# Altium schematic symbol library Ezlo.SchLib: 191 symbols (part 3 of 5)
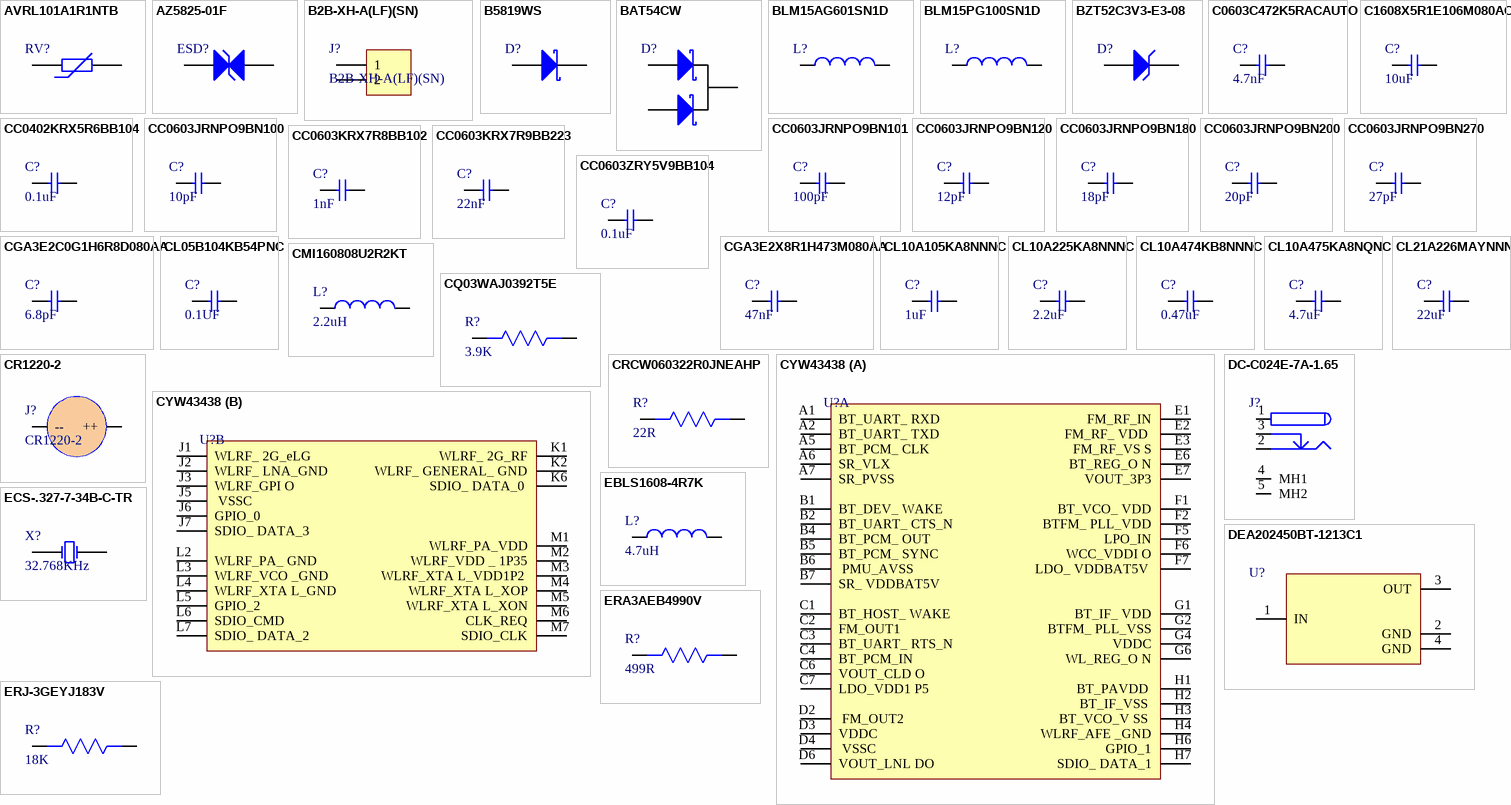
[diagram p10: symbols AVRL101A1R1NTB to ERJ-3GEYJ183V]

## ECS-.327-7-34B-C-TR
designator X?, comment 32.768KHz
Crystals 32.768KHz 7pF; Manufacturer: ECS International; Manufacturer Part Number: ECS-.327-7-34B-C-TR; ESR (Equivalent Series Resistance): 70kR; Frequency Tolerance: 10ppm; Supplier 1: Digi-Key; Stock 1: 27045; Pricing 1: 1=0.8, 10=0.708, 50=0.6622, 100=0.5852, 500=0.5544, 1000=0.462 (USD); Mount: Surface Mount; Case/Package: SMD/SMT; Number of Pins: 2; Min Operating Temperature: -40°C; Max Operating Temperature: 85°C; Frequency: 32.768kHz; Load Capacitance: 7pF; Package Quantity: 3000; Packaging: Tape and Reel; Termination: SMD/SMT; Frequency Stability: 10ppm; Length: 0.126inch; Height: 0.035inch; Width: 0.061inch; Lead Pitch: 2.4mm; ComponentLink1URL: https://datasheet.ciiva.com/12387/ecx-31b-15952-12387920.pdf; ComponentLink1Description: https://datasheet.ciiva.com/12387/ecx-31b-15952-12387920.pdf; ComponentLink2URL: https://datasheet.ciiva.com/15047/ecx-31b-15047071.pdf; ComponentLink2Description: https://datasheet.ciiva.com/15047/ecx-31b-15047071.pdf; Supplier Part Number 1: XC1948CT-ND
footprint ECS-.327-7-34B-C-TR (CRYSTAL 32.7680KHZ 12.5PF SMD)
pins: 1 OSC1, 2 OSC2

## ERA3AEB4990V
designator R?, comment 499R
RES SMD 499 OHM 0.1% 1/10W 0603; Manufacturer: Panasonic; Manufacturer Part Number: ERA-3AEB4990V; Power Rating: 100mW; Voltage Rating: 150V; Temperature Coefficient: 25ppm/°C; Voltage Rating (DC): 75V; Supplier 1: Arrow Electronics; RoHS: Yes; Category: Chip SMD Resistors; Stock 1: 4562; Pricing 1: 1=0.31590, 10=0.28840, 25=0.27580, 100=0.11110, 250=0.10990, 500=0.08340, 1000=0.04530, 3000=0.04480 (USD); Mount: Surface Mount; Case/Package: 0603; Number of Pins: 2; Case Code (Metric): 1608; Case Code (Imperial): 0603; Contact Plating: Tin; Min Operating Temperature: -55°C; Max Operating Temperature: 155°C; Resistance: 499R; Tolerance: 0.1%; Packaging: Tape and Reel; Package Quantity: 1; Resistor Type: Thin Film,Metal Film; Number of Terminations: 2; Termination: SMD/SMT; Max Power Dissipation: 100mW; Features: Automotive AEC-Q200; Series: ERA-3A; Resistance Tolerance: 0.1%; Construction: Rectangular; Technology: METAL FILM; Length: 1.6mm; Width: 0.8mm; Height: 0.45mm; Depth: 0.8mm; Radiation Hardening: No; REACH SVHC: No SVHC; Military Standard: Not; Lead Free: Lead Free; RoHS Compliant: Yes; ComponentLink1URL: https://datasheet.ciiva.com/11810/0900766b80eb1d8c-11810911.pdf?src-supplier=RSComponents; ComponentLink1Description: https://datasheet.ciiva.com/11810/0900766b80eb1d8c-11810911.pdf?src-supplier=RSComponents; ComponentLink2URL: https://datasheet.ciiva.com/29183/451973-da-01-en-widerstand-0603-era-29183924.pdf?src-supplier=Conrad; ComponentLink2Description: https://datasheet.ciiva.com/29183/451973-da-01-en-widerstand-0603-era-29183924.pdf?src-supplier=Conrad; ComponentLink3URL: https://datasheet.ciiva.com/6201/485442-6201036.pdf?src-supplier=Farnell; ComponentLink3Description: https://datasheet.ciiva.com/6201/485442-6201036.pdf?src-supplier=Farnell; ComponentLink4URL: https://datasheet.ciiva.com/7920/485442-7920378.pdf?src-supplier=Element14; ComponentLink4Description: https://datasheet.ciiva.com/7920/485442-7920378.pdf?src-supplier=Element14; ComponentLink5URL: https://datasheet.ciiva.com/7920/485442-7920379.pdf?src-supplier=Element14; ComponentLink5Description: https://datasheet.ciiva.com/7920/485442-7920379.pdf?src-supplier=Element14; ComponentLink6URL: https://datasheet.ciiva.com/9181/aoa0000ce26-9181477.pdf?src-supplier=Avnet; ComponentLink6Description: https://datasheet.ciiva.com/9181/aoa0000ce26-9181477.pdf?src-supplier=Avnet; ComponentLink7URL: https://datasheet.ciiva.com/30161/54aoa0000ce26-30161593.pdf?src-supplier=Onlinecomponents.com; ComponentLink7Description: https://datasheet.ciiva.com/30161/54aoa0000ce26-30161593.pdf?src-supplier=Onlinecomponents.com; Supplier Part Number 1: ERA-3AEB4990V
footprint Res0603
pins: 1, 2

## ERJ-3GEYJ183V
designator R?, comment 18K
RES SMD 18K OHM 5% 1/10W 0603; Manufacturer: Panasonic; Manufacturer Part Number: ERJ-3GEYJ183V; Resistance: 18kR; Power Rating: 100mW; Voltage Rating: 75V; Temperature Coefficient: 200ppm/°C; Voltage Rating (DC): 50V; Supplier 1: Digi-Key; RoHS: Yes; Category: Chip SMD Resistors; Stock 1: 113560; Pricing 1: 1=0.10000, 10=0.03300, 100=0.01360, 1000=0.00610, 2500=0.00529 (USD); Mount: Surface Mount; Case/Package: 0603; Case Code (Metric): 1608; Case Code (Imperial): 0603; Contact Plating: Tin; Min Operating Temperature: -55°C; Max Operating Temperature: 155°C; Tolerance: 5%; Packaging: Tape and Reel; Package Quantity: 1; Resistor Type: Thick Film; Number of Terminations: 2; Termination: SMD/SMT; Max Power Dissipation: 100mW; Features: Automotive AEC-Q200; Series: ERJ; Resistance Tolerance: 5%; Construction: Rectangular; Technology: THICK FILM; Length: 1.6mm; Width: 0.031inch; Height: 0.45mm; Depth: 0.8mm; REACH SVHC: No SVHC; Military Standard: Not; Lead Free: Contains Lead; RoHS Compliant: Yes; ComponentLink1URL: https://datasheet.ciiva.com/11821/0900766b80f806dd-11821418.pdf?src-supplier=RSComponents; ComponentLink1Description: https://datasheet.ciiva.com/11821/0900766b80f806dd-11821418.pdf?src-supplier=RSComponents; ComponentLink2URL: https://datasheet.ciiva.com/30227/4aoa0000ce1-30227125.pdf?src-supplier=Onlinecomponents.com; ComponentLink2Description: https://datasheet.ciiva.com/30227/4aoa0000ce1-30227125.pdf?src-supplier=Onlinecomponents.com; ComponentLink3URL: https://datasheet.ciiva.com/46443/1500035-46443766.pdf?src-supplier=Element14; ComponentLink3Description: https://datasheet.ciiva.com/46443/1500035-46443766.pdf?src-supplier=Element14; ComponentLink4URL: https://datasheet.ciiva.com/9192/aoa0000ce1-9192551.pdf?src-supplier=Avnet; ComponentLink4Description: https://datasheet.ciiva.com/9192/aoa0000ce1-9192551.pdf?src-supplier=Avnet; ComponentLink5URL: https://datasheet.ciiva.com/16786/70255313-16786967.pdf?src-supplier=Allied+Electronics; ComponentLink5Description: https://datasheet.ciiva.com/16786/70255313-16786967.pdf?src-supplier=Allied+Electronics; ComponentLink6URL: https://datasheet.ciiva.com/16775/70255313-16775307.pdf?src-supplier=Allied+Electronics; ComponentLink6Description: https://datasheet.ciiva.com/16775/70255313-16775307.pdf?src-supplier=Allied+Electronics; ComponentLink7URL: https://datasheet.ciiva.com/28590/1678796-28590973.pdf?src-supplier=Element14; ComponentLink7Description: https://datasheet.ciiva.com/28590/1678796-28590973.pdf?src-supplier=Element14; Supplier Part Number 1: P18KGCT-ND
footprint Res0603
pins: 1, 2

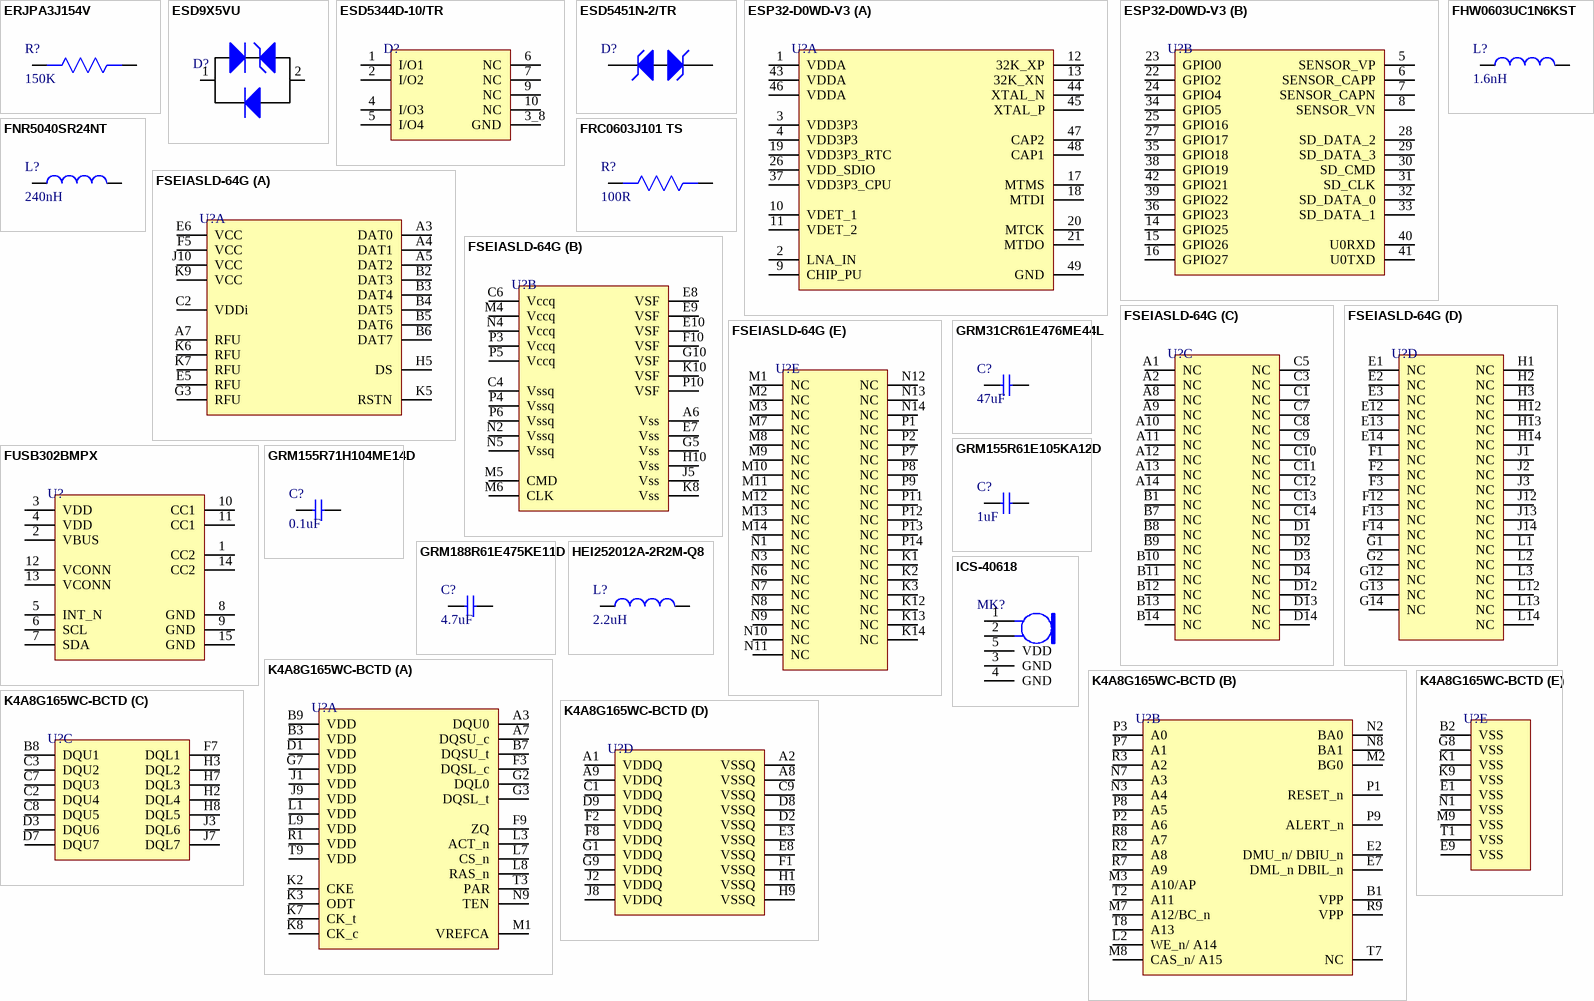
[diagram p2: symbols ERJPA3J154V to K4A8G165WC-BCTD]

## ERJPA3J154V
designator R?, comment 150K
RES SMD 150K OHM 5% 1/3W 0603; Manufacturer: Panasonic; Manufacturer Part Number: ERJ-PA3J154V; Resistance: 150kR; Max Power Dissipation: 250mW; Temperature Coefficient: 200ppm/°C; Supplier 1: Arrow Electronics; RoHS: Yes; Category: Chip SMD Resistors; Stock 1: 30; Pricing 1: 1=0.09570, 10=0.08790, 100=0.03390, 1000=0.01520, 2500=0.01310, 5000=0.01070 (USD); Case/Package: 0603; Case Code (Imperial): 0603; Case Code (Metric): 1608; Min Operating Temperature: -55°C; Max Operating Temperature: 155°C; Features: Automotive AEC-Q200; Tolerance: 5%; Packaging: Tape and Reel; Resistor Type: Thick Film; Number of Terminations: 2; Length: 0.063inch; Width: 0.031inch; Height: 0.018inch; ComponentLink1URL: https://industrial.panasonic.com/cdbs/www-data/pdf/RDO0000/AOA0000C331.pdf?src-supplier=Digi-Key; ComponentLink1Description: https://industrial.panasonic.com/cdbs/www-data/pdf/RDO0000/AOA0000C331.pdf?src-supplier=Digi-Key; Supplier Part Number 1: ERJ-PA3J154V
footprint Res0603
pins: 1, 2

## ESD9X5VU
designator D?
DFN1006-2 ESD Protection Devices ROHS; Manufacturer: TECH PUBLIC; Manufacturer Part Number: ESD9X5VU; Footprint: DFN1006-2; ComponentLink1Description: LCSC; ComponentLink1URL: https://www.lcsc.com/product-detail/span-style-background-color-ff0-ESD-span-Protection-Devices_TECH-PUBLIC-ESD9X5VU_C2875160.html
footprint DFN1006-2L
pins: 1, 2

## ESD5344D-10/TR
designator D?
DFN2510-10L ESD Protection Devices ROHS; Manufacturer: WILLSEMI; Manufacturer Part Number: ESD5344D-10/TR; ComponentLink1Description: LCSC; ComponentLink1URL: https://www.lcsc.com/product-detail/span-style-background-color-ff0-ESD-span-Protection-Devices_WILLSEMI-Will-Semicon-ESD5344D-10-TR_C239666.html; Footprint: DFN2510-10L
footprint DFN2510-10L
pins: 1 I/O1, 2 I/O2, 3_8 GND, 4 I/O3, 5 I/O4, 6 NC, 7 NC, 9 NC, 10 NC

## ESD5451N-2/TR
designator D?
DFN1006-2L ESD Protection Devices ROHS; Manufacturer: WILLSEMI; Manufacturer Part Number: ESD5451N-2/TR; ComponentLink1Description: LCSC; ComponentLink1URL: https://www.lcsc.com/product-detail/TVS_Will-Semicon-ESD5451N-2-TR_C239604.html; Footprint: DFN1006-2L
footprint DFN1006-2L
pins: 1 K, 2 k

## ESP32-D0WD-V3
designator U?
IC RF TXRX+MCU BLUETOOTH WIFI; Manufacturer: Espressif Systems; Manufacturer Part Number: ESP32-D0WD-V3; Supplier 1: Digi-Key; RoHS: No; Category: RF Receivers, Transceivers; Stock 1: 29666; Pricing 1: 1=1.80000 (USD); Supplier Part Number 1: 1904-ESP32-D0WD-V3CT-ND
footprint ESP32-D0WD-V3
part A pins: 1 VDDA, 2 LNA_IN, 3 VDD3P3, 4 VDD3P3, 9 CHIP_PU, 10 VDET_1, 11 VDET_2, 12 32K_XP, 13 32K_XN, 17 MTMS, 18 MTDI, 19 VDD3P3_RTC, 20 MTCK, 21 MTDO, 26 VDD_SDIO, 37 VDD3P3_CPU, 43 VDDA, 44 XTAL_N, 45 XTAL_P, 46 VDDA, 47 CAP2, 48 CAP1, 49 GND
part B pins: 5 SENSOR_VP, 6 SENSOR_CAPP, 7 SENSOR_CAPN, 8 SENSOR_VN, 14 GPIO25, 15 GPIO26, 16 GPIO27, 22 GPIO2, 23 GPIO0, 24 GPIO4, 25 GPIO16, 27 GPIO17, 28 SD_DATA_2, 29 SD_DATA_3, 30 SD_CMD, 31 SD_CLK, 32 SD_DATA_0, 33 SD_DATA_1, 34 GPIO5, 35 GPIO18, 36 GPIO23, 38 GPIO19, 39 GPIO22, 40 U0RXD, 41 U0TXD, 42 GPIO21

## FHW0603UC1N6KST
designator L?, comment 1.6nH
700mA 1.6nH ±10% 40mΩ 0603 Inductors (SMD) ROHS; Manufacturer Part Number: FHW0603UC1N6KST; Manufacturer: FH; Footprint: 0603; Value: 1.6nH
footprint IND 0603
pins: 1, 2

## FNR5040SR24NT
designator L?, comment 240nH
6.4A 240nH ±30% 8mΩ SMD Power Inductors ROHS; Manufacturer: cjiang; Manufacturer Part Number: FNR5040SR24NT; Footprint: Custom; ComponentLink1Description: LCSC; ComponentLink1URL: https://www.lcsc.com/product-detail/span-style-background-color-ff0-Power-span-span-style-background-color-ff0-Inductors-span_cjiang-Changjiang-Microelectronics-Tech-FNR5040SR24NT_C167951.html
footprint FNR5040SR24NT
pins: 1, 2

## FRC0603J101 TS
designator R?, comment 100R
100mW Thick Film Resistors 50V ±5% ±100ppm/℃ -55℃~+155℃ 100Ω 0603 Chip Resistor - Surface Mount ROHS; Manufacturer Part Number: FRC0603J101 TS; Manufacturer: FOJAN; Value: 100R; Footprint: 0603
footprint Res0603
pins: 1, 2

## FSEIASLD-64G
designator U?
BGA-153 eMMC ROHS; Manufacturer: FORESEE; Manufacturer Part Number: FSEIASLD-64G; Footprint: BGA-153; ComponentLink1Description: LCSC; ComponentLink1URL: https://lcsc.com/product-detail/eMMC_FORESEE-FSEIASLD-64G_C719922.html
footprint BGA-153
part A pins: A3 DAT0, A4 DAT1, A5 DAT2, A7 RFU, B2 DAT3, B3 DAT4, B4 DAT5, B5 DAT6, B6 DAT7, C2 VDDi, E5 RFU, E6 VCC, F5 VCC, G3 RFU, H5 DS, J10 VCC, K5 RSTN, K6 RFU, K7 RFU, K9 VCC
part B pins: A6 Vss, C4 Vssq, C6 Vccq, E7 Vss, E8 VSF, E9 VSF, E10 VSF, F10 VSF, G5 Vss, G10 VSF, H10 Vss, J5 Vss, K8 Vss, K10 VSF, M4 Vccq, M5 CMD, M6 CLK, N2 Vssq, N4 Vccq, N5 Vssq, P3 Vccq, P4 Vssq, P5 Vccq, P6 Vssq, P10 VSF
part C pins: A1 NC, A2 NC, A8 NC, A9 NC, A10 NC, A11 NC, A12 NC, A13 NC, A14 NC, B1 NC, B7 NC, B8 NC, B9 NC, B10 NC, B11 NC, B12 NC, B13 NC, B14 NC, C1 NC, C3 NC, C5 NC, C7 NC, C8 NC, C9 NC, C10 NC, C11 NC, C12 NC, C13 NC, C14 NC, D1 NC, D2 NC, D3 NC, D4 NC, D12 NC, D13 NC, D14 NC
part D pins: E1 NC, E2 NC, E3 NC, E12 NC, E13 NC, E14 NC, F1 NC, F2 NC, F3 NC, F12 NC, F13 NC, F14 NC, G1 NC, G2 NC, G12 NC, G13 NC, G14 NC, H1 NC, H2 NC, H3 NC, H12 NC, H13 NC, H14 NC, J1 NC, J2 NC, J3 NC, J12 NC, J13 NC, J14 NC, L1 NC, L2 NC, L3 NC, L12 NC, L13 NC, L14 NC
part E pins: K1 NC, K2 NC, K3 NC, K12 NC, K13 NC, K14 NC, M1 NC, M2 NC, M3 NC, M7 NC, M8 NC, M9 NC, M10 NC, M11 NC, M12 NC, M13 NC, M14 NC, N1 NC, N3 NC, N6 NC, N7 NC, N8 NC, N9 NC, N10 NC, N11 NC, N12 NC, N13 NC, N14 NC, P1 NC, P2 NC, P7 NC, P8 NC, P9 NC, P11 NC, P12 NC, P13 NC, P14 NC

## FUSB302BMPX
designator U?
Full Speed Programmable USB Power Delivery Controller USB 3.1 3.3V T/R 14-Pin WQFN EP; Manufacturer: ON Semiconductor / Fairchild; Manufacturer Part Number: FUSB302MPX; Operating Supply Current: 25uA; Supplier 1: RSComponents; RoHS: Yes; Category: Integrated Circuits (ICs); Stock 1: 95; Pricing 1: 3000=0.62400 (GBP); Mount: Surface Mount; Min Operating Temperature: -40°C; Max Operating Temperature: 85°C; Interface: USB; Packaging: Cut Tape; RoHS Compliant: Yes; ComponentLink1URL: http://www.farnell.com/datasheets/2313409.pdf?src-supplier=Farnell; ComponentLink1Description: http://www.farnell.com/datasheets/2313409.pdf?src-supplier=Farnell; ComponentLink2URL: http://www.mouser.com/ds/2/149/FUSB302-769336.pdf?src-supplier=Mouser; ComponentLink2Description: http://www.mouser.com/ds/2/149/FUSB302-769336.pdf?src-supplier=Mouser; ComponentLink3URL: https://www.fairchildsemi.com/datasheets/FU/FUSB302.pdf?src-supplier=Digi-Key; ComponentLink3Description: https://www.fairchildsemi.com/datasheets/FU/FUSB302.pdf?src-supplier=Digi-Key; Supplier Part Number 1: 1464429; Supplier 2: Digi-Key; Stock 2: 9412; Pricing 2: 1=1.27000, 10=1.13500, 25=1.07720, 100=0.88500, 250=0.82728, 500=0.73108, 1000=0.57717 (USD); ComponentLink4URL: http://www.farnell.com/datasheets/2313408.pdf?src-supplier=Farnell; ComponentLink4Description: http://www.farnell.com/datasheets/2313408.pdf?src-supplier=Farnell; ComponentLink5URL: http://www.onsemi.com/pub/Collateral/FUSB302B-D.PDF?src-supplier=Digi-Key; ComponentLink5Description: http://www.onsemi.com/pub/Collateral/FUSB302B-D.PDF?src-supplier=Digi-Key; Supplier Part Number 2: FUSB302BMPXCT-ND
footprint 14-MLP (2.5x2.5)
pins: 1 CC2, 2 VBUS, 3 VDD, 4 VDD, 5 INT_N, 6 SCL, 7 SDA, 8 GND, 9 GND, 10 CC1, 11 CC1, 12 VCONN, 13 VCONN, 14 CC2, 15 GND

## GRM31CR61E476ME44L
designator C?, comment 47uF
CAP CER 47UF 25V X5R 1206; Manufacturer: Murata; Manufacturer Part Number: GRM31CR61E476ME44L; Tolerance: 20%; Supplier 1: Digi-Key; RoHS: Yes; Category: Ceramic Capacitors; Voltage Rating (DC): 25V; Dielectric: X5R; Capacitance: 47uF; Length: 3.2mm; Width: 1.6mm; Thickness: 1.6mm; RoHS Compliant: Yes; ComponentLink1URL: https://search.murata.co.jp/Ceramy/image/img/A01X/partnumbering_e_01.pdf?src-supplier=Digi-Key; ComponentLink1Description: https://search.murata.co.jp/Ceramy/image/img/A01X/partnumbering_e_01.pdf?src-supplier=Digi-Key; Supplier Part Number 1: 490-16268-2-ND
footprint Cap1206 (SMD 1206)
pins: 1, 2

## GRM155R61E105KA12D
designator C?, comment 1uF
CAP CER 1UF 25V X5R 0402; Manufacturer: Murata; Manufacturer Part Number: GRM155R61E105KA12D; Material: Ceramic; Tolerance: 10%; Supplier 1: Digi-Key; Stock 1: 1194305; Pricing 1: 1=0.11, 10=0.077, 100=0.0363, 500=0.02546, 1000=0.02108, 2500=0.01962, 5000=0.01795 (USD); Mount: Surface Mount; Case/Package: 0402; Weight: 0.000212oz; Case Code (Metric): 1005; Case Code (Imperial): 0402; Min Operating Temperature: -55°C; Max Operating Temperature: 85°C; Capacitance: 1uF; Voltage Rating: 25V; Packaging: Tape and Reel; Dielectric: X5R; Voltage: 25V; Termination: SMD/SMT; Voltage Rating (DC): 25V; Package Quantity: 10000; Length: 1mm; Height: 0.5mm; Width: 0.5mm; Thickness: 0.022inch; Depth: 0.5mm; REACH SVHC: No SVHC; Lead Free: Lead Free; ComponentLink1URL: http://www.farnell.com/datasheets/2048341.pdf?src-supplier=Element14; ComponentLink1Description: http://www.farnell.com/datasheets/2048341.pdf?src-supplier=Element14; Supplier Part Number 1: 490-10017-1-ND
footprint Cap0402
pins: 1, 2

## GRM155R71H104ME14D
designator C?, comment 0.1uF
CAP CER 0.1UF 50V X7R 0402; Manufacturer: Murata; Manufacturer Part Number: GRM155R71H104ME14D; Tolerance: 20%; Capacitance: 100nF; Supplier 1: Digi-Key; Stock 1: 439844; Pricing 1: 1=0.1, 10=0.038, 100=0.0168, 500=0.01198, 1000=0.00941, 2500=0.00855, 5000=0.00787 (USD); Mount: Surface Mount; Case/Package: 0402; Min Operating Temperature: -55°C; Max Operating Temperature: 125°C; Packaging: Cut Tape; Voltage Rating: 50V; Length: 0.039inch; Width: 0.02inch; Thickness: 0.022inch; ComponentLink1URL: http://search.murata.co.jp/Ceramy/image/img/A01X/G101/ENG/GRM155R71H104ME14-01.pdf?src-supplier=Digi-Key; ComponentLink1Description: http://search.murata.co.jp/Ceramy/image/img/A01X/G101/ENG/GRM155R71H104ME14-01.pdf?src-supplier=Digi-Key; ComponentLink2URL: http://psearch.en.murata.com/capacitor/product/GRM155R71H104ME14%23.pdf?src-supplier=Avnet; ComponentLink2Description: http://psearch.en.murata.com/capacitor/product/GRM155R71H104ME14%23.pdf?src-supplier=Avnet; ComponentLink3URL: http://components.arrow.com/part/dataview/0323_07177683?src-supplier=Arrow+Europe; ComponentLink3Description: http://components.arrow.com/part/dataview/0323_07177683?src-supplier=Arrow+Europe; ComponentLink4URL: http://www.mouser.com/ds/2/281/c02e-2905.pdf?src-supplier=Mouser; ComponentLink4Description: http://www.mouser.com/ds/2/281/c02e-2905.pdf?src-supplier=Mouser; Supplier Part Number 1: 490-10701-1-ND
footprint Cap 0402
pins: 1, 2

## GRM188R61E475KE11D
designator C?, comment 4.7uF
CAP CER 4.7UF 25V X5R 0603; Manufacturer: Murata; Manufacturer Part Number: GRM188R61E475KE11D; Material: Ceramic; Tolerance: 10%; Supplier 1: Digi-Key; Stock 1: 71618; Pricing 1: 1=0.37, 10=0.258, 100=0.1549, 500=0.1162, 1000=0.09812 (USD); Mount: Surface Mount; Case/Package: 0603; Case Code (Metric): 1608; Case Code (Imperial): 0603; Min Operating Temperature: -55°C; Max Operating Temperature: 85°C; Package Quantity: 4000; Packaging: Cut Tape; Capacitance: 4.7uF; Voltage Rating: 25V; Dielectric: X5R; Voltage: 25V; Voltage Rating (DC): 25V; Length: 1.6mm; Height: 0.8mm; Width: 0.031inch; Thickness: 0.031inch; Depth: 0.8mm; REACH SVHC: No SVHC; Lead Free: Lead Free; ComponentLink1URL: http://www.farnell.com/datasheets/2048165.pdf?src-supplier=Element14; ComponentLink1Description: http://www.farnell.com/datasheets/2048165.pdf?src-supplier=Element14; ComponentLink2URL: https://www.murata.com/~/media/webrenewal/support/library/catalog/products/capacitor/mlcc/c02e.ashx?la=en-us&src-supplier=Digi-Key; ComponentLink2Description: https://www.murata.com/~/media/webrenewal/support/library/catalog/products/capacitor/mlcc/c02e.ashx?la=en-us&src-supplier=Digi-Key; Supplier Part Number 1: 490-7203-1-ND
footprint Cap0603
pins: 1, 2

## HEI252012A-2R2M-Q8
designator L?, comment 2.2uH
2.5A 2.2uH ±20% 74mΩ SMD Power Inductors ROHS; Manufacturer: Chilisin Elec; Manufacturer Part Number: HEI252012A-2R2M-Q8; ComponentLink1Description: LCSC; ComponentLink1URL: https://lcsc.com/product-detail/Power-Inductors_Chilisin-Elec-HEI252012A-2R2M-Q8_C412888.html; Footprint: Custom
footprint HEI252012A-2R2M-Q8 (IND SMD 2.2uH 2.5A)
pins: 1, 2

## ICS-40618
designator MK?
MICROPHONE MEMS ANALOG OMNI; Manufacturer: TDK InvenSense; Manufacturer Part Number: ICS-40618; Shape: Rectangular; Direction: Omnidirectional; Operating Supply Current: 190uA; Supplier 1: RSComponents; RoHS: No; Category: Microphones; Stock 1: 500; Pricing 1: 200=1.80400, 1000=1.75400, 2500=1.71200, 5000=1.66700 (GBP); Output Type: Analog; Packaging: Tape and Reel; Termination: Solder; RoHS Compliant: No; ComponentLink1URL: https://www.mouser.com/ds/2/400/DS-000044-ICS-40618-v1.0-1115536.pdf?src-supplier=Mouser; ComponentLink1Description: https://www.mouser.com/ds/2/400/DS-000044-ICS-40618-v1.0-1115536.pdf?src-supplier=Mouser; ComponentLink2URL: https://www.invensense.com/wp-content/uploads/2016/02/DS-000044-ICS-40618-v1.0.pdf?src-supplier=Digi-Key; ComponentLink2Description: https://www.invensense.com/wp-content/uploads/2016/02/DS-000044-ICS-40618-v1.0.pdf?src-supplier=Digi-Key; Supplier Part Number 1: 2182224P
footprint ICS-40618 (MICROPHONE MEMS ANALOG OMNI)
pins: 1 OUTPUT+, 2 OUTPUT-, 3 GND, 4 GND, 5 VDD

## K4A8G165WC-BCTD
designator U?
IC DDR4 Sdram 512M16 1.2V 96FBGA; Manufacturer: Samsung; Manufacturer Part Number: K4A8G165WC-BCTD; Supplier 1: Arrow Electronics; RoHS: Yes; Supplier Part Number 1: K4A8G165WC-BCTD
footprint FBGA-96
part A pins: A3 DQU0, A7 DQSU_c, B3 VDD, B7 DQSU_t, B9 VDD, D1 VDD, F3 DQSL_c, F9 ZQ, G2 DQL0, G3 DQSL_t, G7 VDD, J1 VDD, J9 VDD, K2 CKE, K3 ODT, K7 CK_t, K8 CK_c, L1 VDD, L3 ACT_n, L7 CS_n, L8 RAS_n, L9 VDD, M1 VREFCA, N9 TEN, R1 VDD, T3 PAR, T9 VDD
part B pins: B1 VPP, E2 DMU_n/ DBIU_n, E7 DML_n DBIL_n, L2 WE_n/ A14, M2 BG0, M3 A10/AP, M7 A12/BC_n, M8 CAS_n/ A15, N2 BA0, N3 A4, N7 A3, N8 BA1, P1 RESET_n, P2 A6, P3 A0, P7 A1, P8 A5, P9 ALERT_n, R2 A8, R3 A2, R7 A9, R8 A7, R9 VPP, T2 A11, T7 NC, T8 A13
part C pins: B8 DQU1, C2 DQU4, C3 DQU2, C7 DQU3, C8 DQU5, D3 DQU6, D7 DQU7, F7 DQL1, H2 DQL4, H3 DQL2, H7 DQL3, H8 DQL5, J3 DQL6, J7 DQL7
part D pins: A1 VDDQ, A2 VSSQ, A8 VSSQ, A9 VDDQ, C1 VDDQ, C9 VSSQ, D2 VSSQ, D8 VSSQ, D9 VDDQ, E3 VSSQ, E8 VSSQ, F1 VSSQ, F2 VDDQ, F8 VDDQ, G1 VDDQ, G9 VDDQ, H1 VSSQ, H9 VSSQ, J2 VDDQ, J8 VDDQ
part E pins: B2 VSS, E1 VSS, E9 VSS, G8 VSS, K1 VSS, K9 VSS, M9 VSS, N1 VSS, T1 VSS

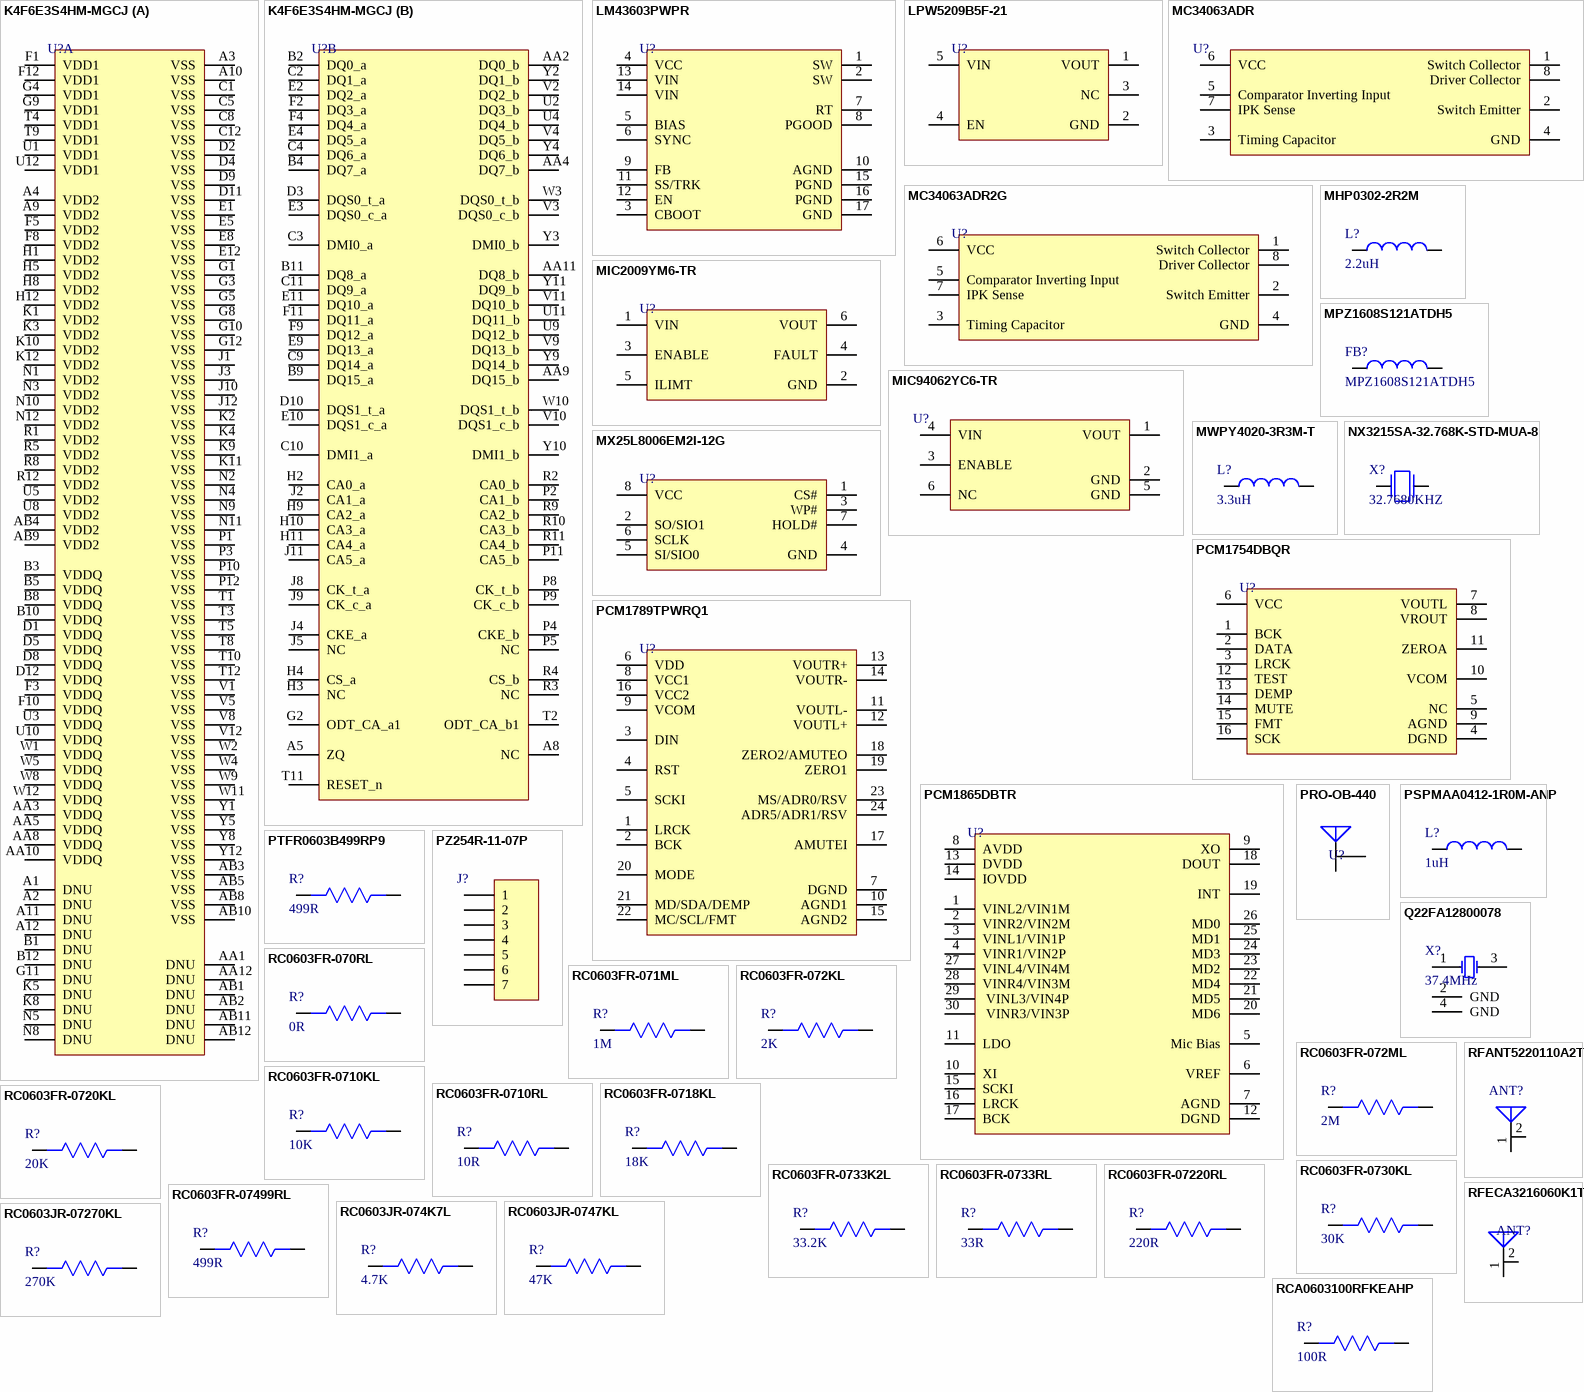
[diagram p3: symbols K4F6E3S4HM-MGCJ to RFECA3216060K1T]

## K4F6E3S4HM-MGCJ
designator U?
FBGA-200 DDR SDRAM ROHS; Manufacturer: Samsung; Manufacturer Part Number: K4F6E3S4HM-MGCJ; Footprint: FBGA-200; ComponentLink1Description: LCSC; ComponentLink1URL: https://www.lcsc.com/product-detail/DDR-SDRAM_Samsung-K4F6E3S4HM-MGCJ_C2842431.html
footprint FBGA-200
part A pins: A1 DNU, A2 DNU, A3 VSS, A4 VDD2, A9 VDD2, A10 VSS, A11 DNU, A12 DNU, AA1 DNU, AA3 VDDQ, AA5 VDDQ, AA8 VDDQ, AA10 VDDQ, AA12 DNU, AB1 DNU, AB2 DNU, AB3 VSS, AB4 VDD2, AB5 VSS, AB8 VSS, AB9 VDD2, AB10 VSS, AB11 DNU, AB12 DNU, B1 DNU, B3 VDDQ, B5 VDDQ, B8 VDDQ, B10 VDDQ, B12 DNU, C1 VSS, C5 VSS, C8 VSS, C12 VSS, D1 VDDQ, D2 VSS, D4 VSS, D5 VDDQ, D8 VDDQ, D9 VSS, D11 VSS, D12 VDDQ, E1 VSS, E5 VSS, E8 VSS, E12 VSS, F1 VDD1, F3 VDDQ, F5 VDD2, F8 VDD2, F10 VDDQ, F12 VDD1, G1 VSS, G3 VSS, G4 VDD1, G5 VSS, G8 VSS, G9 VDD1, G10 VSS, G11 DNU, G12 VSS, H1 VDD2, H5 VDD2, H8 VDD2, H12 VDD2, J1 VSS, J3 VSS, J10 VSS, J12 VSS, K1 VDD2, K2 VSS, K3 VDD2, K4 VSS, K5 DNU, K8 DNU, K9 VSS, K10 VDD2, K11 VSS, K12 VDD2, N1 VDD2, N2 VSS, N3 VDD2, N4 VSS, N5 DNU, N8 DNU, N9 VSS, N10 VDD2, N11 VSS, N12 VDD2, P1 VSS, P3 VSS, P10 VSS, P12 VSS, R1 VDD2, R5 VDD2, R8 VDD2, R12 VDD2, T1 VSS, T3 VSS, T4 VDD1, T5 VSS, T8 VSS, T9 VDD1, T10 VSS, T12 VSS, U1 VDD1, U3 VDDQ, U5 VDD2, U8 VDD2, U10 VDDQ, U12 VDD1, V1 VSS, V5 VSS, V8 VSS, V12 VSS, W1 VDDQ, W2 VSS, W4 VSS, W5 VDDQ, W8 VDDQ, W9 VSS, W11 VSS, W12 VDDQ, Y1 VSS, Y5 VSS, Y8 VSS, Y12 VSS
part B pins: A5 ZQ, A8 NC, AA2 DQ0_b, AA4 DQ7_b, AA9 DQ15_b, AA11 DQ8_b, B2 DQ0_a, B4 DQ7_a, B9 DQ15_a, B11 DQ8_a, C2 DQ1_a, C3 DMI0_a, C4 DQ6_a, C9 DQ14_a, C10 DMI1_a, C11 DQ9_a, D3 DQS0_t_a, D10 DQS1_t_a, E2 DQ2_a, E3 DQS0_c_a, E4 DQ5_a, E9 DQ13_a, E10 DQS1_c_a, E11 DQ10_a, F2 DQ3_a, F4 DQ4_a, F9 DQ12_a, F11 DQ11_a, G2 ODT_CA_a1, H2 CA0_a, H3 NC, H4 CS_a, H9 CA2_a, H10 CA3_a, H11 CA4_a, J2 CA1_a, J4 CKE_a, J5 NC, J8 CK_t_a, J9 CK_c_a, J11 CA5_a, P2 CA1_b, P4 CKE_b, P5 NC, P8 CK_t_b, P9 CK_c_b, P11 CA5_b, R2 CA0_b, R3 NC, R4 CS_b, R9 CA2_b, R10 CA3_b, R11 CA4_b, T2 ODT_CA_b1, T11 RESET_n, U2 DQ3_b, U4 DQ4_b, U9 DQ12_b, U11 DQ11_b, V2 DQ2_b, V3 DQS0_c_b, V4 DQ5_b, V9 DQ13_b, V10 DQS1_c_b, V11 DQ10_b, W3 DQS0_t_b, W10 DQS1_t_b, Y2 DQ1_b, Y3 DMI0_b, Y4 DQ6_b, Y9 DQ14_b, Y10 DMI1_b, Y11 DQ9_b

## LM43603PWPR
designator U?
IC REG BUCK ADJ 3A 16HTSSOP; Manufacturer: Texas Instruments; Manufacturer Part Number: LM43603PWPR; Number of Outputs: 1; Output Voltage: 28V; Min Input Voltage: 3.5V; Max Input Voltage: 36V; Switching Frequency: 2.2MHz; Quiescent Current: 27uA; Supplier 1: Digi-Key; RoHS: Yes; Category: Power Supply Modules; Pricing 1: 1=5.03000, 10=4.51800, 25=4.27160, 100=3.70200, 250=3.51216, 500=3.15144, 1000=3.13425 (USD); Mount: Surface Mount; Case/Package: SOP; Number of Pins: 16; Weight: 0.225753oz; Min Operating Temperature: -40°C; Max Operating Temperature: 125°C; Packaging: Tape and Reel; Max Output Current: 3A; Package Quantity: 2000; Operating Supply Voltage: 36V; Radiation Hardening: No; Lead Free: Lead Free; RoHS Compliant: Yes; ComponentLink1URL: http://www.ti.com/general/docs/lit/getliterature.tsp?genericPartNumber=LM43603&&fileType=pdf&src-supplier=Avnet; ComponentLink1Description: http://www.ti.com/general/docs/lit/getliterature.tsp?genericPartNumber=LM43603&&fileType=pdf&src-supplier=Avnet; ComponentLink2URL: http://www.ti.com/general/docs/suppproductinfo.tsp?distId=10&amp;gotoUrl=http%3A%2F%2Fwww.ti.com%2Flit%2Fgpn%2Flm43603&src-supplier=Digi-Key; ComponentLink2Description: http://www.ti.com/general/docs/suppproductinfo.tsp?distId=10&amp;gotoUrl=http%3A%2F%2Fwww.ti.com%2Flit%2Fgpn%2Flm43603&src-supplier=Digi-Key; ComponentLink3URL: http://www.ti.com/lit/ds/symlink/lm43603.pdf?src-supplier=Digi-Key; ComponentLink3Description: http://www.ti.com/lit/ds/symlink/lm43603.pdf?src-supplier=Digi-Key; ComponentLink4URL: http://www.ti.com/lit/gpn/lm43603?src-supplier=Mouser; ComponentLink4Description: http://www.ti.com/lit/gpn/lm43603?src-supplier=Mouser; Supplier Part Number 1: 296-44477-1-ND
footprint HTSSOP-16
pins: 1 SW, 2 SW, 3 CBOOT, 4 VCC, 5 BIAS, 6 SYNC, 7 RT, 8 PGOOD, 9 FB, 10 AGND, 11 SS/TRK, 12 EN, 13 VIN, 14 VIN, 15 PGND, 16 PGND, 17 GND

## LPW5209B5F-21
designator U?
2.1Amp SOT-23-5 Power Distribution Switches ROHS; Manufacturer: LOWPOWER; Manufacturer Part Number: LPW5209B5F-21; Supplier 1: LCSC; RoHS: No; Stock 1: 3390; Pricing 1: 5=0.14760, 50=0.12140, 150=0.10820, 500=0.09840, 2500=0.09050, 5000=0.08660 (USD); Supplier Part Number 1: C517266; ComponentLink1Description: LCSC; ComponentLink1URL: https://www.lcsc.com/product-detail/Power-Distribution-Switches_LOWPOWER-LPW5209B5F-21_C517266.html
footprint SOT-23-5
pins: 1 VOUT, 2 GND, 3 NC, 4 EN, 5 VIN

## MC34063ADR
designator U?
IC REG BUCK BST ADJ 1.5A 8SOIC; Manufacturer: Texas Instruments; Manufacturer Part Number: MC34063ADR; Output Voltage: 40V; Number of Outputs: 1; Switching Frequency: 100kHz; Synchronous Rectifier: No; Output Type: Adjustable; Max Output Current: 750mA; Min Input Voltage: 3V; Min Output Voltage: 1.55V; Quiescent Current: 4mA; Topology: Flyback,SEPIC; Supplier 1: Digi-Key; RoHS: Yes; Category: Power Supply Modules; Stock 1: 17204; Pricing 1: 1=0.78000, 10=0.68400, 25=0.64240, 100=0.52420, 250=0.48688, 500=0.41438, 1000=0.34206 (USD); Case/Package: D; Number of Pins: 8; Weight: 0.002561oz; Contact Plating: Gold; Min Operating Temperature: 0°C; Max Operating Temperature: 70°C; Output Current: 1.5A; Packaging: Tape and Reel; Package Quantity: 1; Max Input Voltage: 40V; Max Output Voltage: 40V; Termination: SMD/SMT; Radiation Hardening: No; RoHS Compliant: Yes; Lead Free: Lead Free; REACH SVHC: No SVHC; ComponentLink1URL: https://datasheet.ciiva.com/7408/1862376-7408060.pdf?src-supplier=Newark; ComponentLink1Description: https://datasheet.ciiva.com/7408/1862376-7408060.pdf?src-supplier=Newark; ComponentLink2URL: https://datasheet.ciiva.com/2025/mc33063a-2025162.pdf?src-supplier=Digi-Key; ComponentLink2Description: https://datasheet.ciiva.com/2025/mc33063a-2025162.pdf?src-supplier=Digi-Key; ComponentLink3URL: https://datasheet.ciiva.com/2025/mc33063a-2025161.pdf?src-supplier=Digi-Key; ComponentLink3Description: https://datasheet.ciiva.com/2025/mc33063a-2025161.pdf?src-supplier=Digi-Key; ComponentLink4URL: https://datasheet.ciiva.com/2025/mc33063a-2025163.pdf?src-supplier=Digi-Key; ComponentLink4Description: https://datasheet.ciiva.com/2025/mc33063a-2025163.pdf?src-supplier=Digi-Key; Supplier Part Number 1: 296-17765-1-ND
footprint SOIC-8
pins: 1 Switch Collector, 2 Switch Emitter, 3 Timing Capacitor, 4 GND, 5 Comparator Inverting Input, 6 VCC, 7 IPK Sense, 8 Driver Collector

## MC34063ADR2G
designator U?
IC REG BUCK BOOST INV ADJ 8SOIC; Manufacturer: ON Semiconductor; Manufacturer Part Number: MC34063ADR2G; Number of Outputs: 1; Output Voltage: 40V; Max Output Current: 1.5A; Min Input Voltage: 3V; Switching Frequency: 100kHz; Synchronous Rectifier: No; Min Output Voltage: 1.25V; Output Type: Adjustable; Supplier 1: Arrow Electronics; RoHS: Yes; Category: Voltage Regulators - Switching; Stock 1: 2000; Pricing 1: 1=0.59300, 10=0.47930, 25=0.47460, 100=0.29030, 250=0.28740, 500=0.28460, 1000=0.25300, 3000=0.22150 (USD); Mount: Surface Mount; Case/Package: SOIC; Number of Pins: 8; Contact Plating: Tin,Matte; Min Operating Temperature: 0°C; Max Operating Temperature: 70°C; Package Quantity: 1; Packaging: Tape and Reel; Output Current: 1.5A; Max Input Voltage: 40V; Max Output Voltage: 40V; Series: -; Switching Frequency-Max: 100kHz; Length: 5mm; Width: 4mm; Height: 1.5mm; Radiation Hardening: No; REACH SVHC: No SVHC; Lead Free: Lead Free; Halogen Free: Halogen Free; RoHS Compliant: Yes; ComponentLink1URL: https://datasheet.ciiva.com/34301/871666-34301629.pdf?src-supplier=Jameco; ComponentLink1Description: https://datasheet.ciiva.com/34301/871666-34301629.pdf?src-supplier=Jameco; ComponentLink2URL: https://datasheet.ciiva.com/15112/getdatasheetpartid-59933-15112667.pdf?src-supplier=Verical; ComponentLink2Description: https://datasheet.ciiva.com/15112/getdatasheetpartid-59933-15112667.pdf?src-supplier=Verical; ComponentLink3URL: https://datasheet.ciiva.com/2025/mc34063a-d-2025168.pdf?src-supplier=Digi-Key; ComponentLink3Description: https://datasheet.ciiva.com/2025/mc34063a-d-2025168.pdf?src-supplier=Digi-Key; ComponentLink4URL: https://datasheet.ciiva.com/3217/mc34063a-d-3217624.pdf?src-supplier=Avnet; ComponentLink4Description: https://datasheet.ciiva.com/3217/mc34063a-d-3217624.pdf?src-supplier=Avnet; ComponentLink5URL: https://datasheet.ciiva.com/3217/mc34063a-d-3217493.pdf?src-supplier=Avnet; ComponentLink5Description: https://datasheet.ciiva.com/3217/mc34063a-d-3217493.pdf?src-supplier=Avnet; ComponentLink6URL: https://datasheet.ciiva.com/2025/mc34063a-d-2025169.pdf?src-supplier=Digi-Key; ComponentLink6Description: https://datasheet.ciiva.com/2025/mc34063a-d-2025169.pdf?src-supplier=Digi-Key; ComponentLink7URL: https://datasheet.ciiva.com/2025/mc34063a-d-2025167.pdf?src-supplier=Digi-Key; ComponentLink7Description: https://datasheet.ciiva.com/2025/mc34063a-d-2025167.pdf?src-supplier=Digi-Key; Supplier Part Number 1: MC34063ADR2G
footprint SOIC-8
pins: 1 Switch Collector, 2 Switch Emitter, 3 Timing Capacitor, 4 GND, 5 Comparator Inverting Input, 6 VCC, 7 IPK Sense, 8 Driver Collector

## MHP0302-2R2M
designator L?, comment 2.2uH
2.8A 2.2uH ±20% 60mΩ 4A SMD,3.4x3x1.8mm Power Inductors ROHS; Manufacturer: Me-TECH; Manufacturer Part Number: MHP0302-2R2M; Footprint: Custom; ComponentLink1Description: LCSC; ComponentLink1URL: https://lcsc.com/product-detail/Power-Inductors_Me-TECH-MHP0302-2R2M_C2934937.html
footprint MHP0302-2R2M
pins: 1, 2

## MIC2009YM6-TR
designator U?
IC PWR SWITCH P-CHAN 1:1 SOT23-6; Manufacturer: Microchip; Manufacturer Part Number: MIC2009YM6-TR; Number of Outputs: 1; Min Supply Voltage: 2.5V; Max Supply Voltage: 5.5V; Nominal Supply Current: 330uA; Interface: On/Off; Max Output Current: 2A; On-State Resistance: 70mR; Turn-On Delay Time: 1500us; Output Voltage: 6V; Fault Protection: Over Temperature; Output Configuration: High Side; On-state Resistance-Max: 100MR; Supplier 1: RSComponents; RoHS: Yes; Category: Hot Swap Controllers; Stock 1: 1; Pricing 1: 5=1.39500, 25=1.35500, 100=1.30600 (USD); Mount: Surface Mount; Case/Package: SOT-23; Number of Pins: 6; Min Operating Temperature: -40°C; Max Operating Temperature: 85°C; Packaging: Tape and Reel; Package Quantity: 3000; Max Input Voltage: 5.5V; Min Input Voltage: 2.5V; Series: -; Supply Current: 330uA; Number of Switches: 1; Length: 2.9mm; Width: 1.75mm; Height: 1.3mm; Radiation Hardening: No; REACH SVHC: No SVHC; Lead Free: Lead Free; RoHS Compliant: Yes; ComponentLink1URL: https://datasheet.ciiva.com/15108/getdatasheetpartid-300509-15108513.pdf?src-supplier=Verical; ComponentLink1Description: https://datasheet.ciiva.com/15108/getdatasheetpartid-300509-15108513.pdf?src-supplier=Verical; ComponentLink2URL: https://datasheet.ciiva.com/7643/1670778-7643767.pdf?src-supplier=Element14; ComponentLink2Description: https://datasheet.ciiva.com/7643/1670778-7643767.pdf?src-supplier=Element14; ComponentLink3URL: https://datasheet.ciiva.com/1962/mic20xx-1962500.pdf?src-supplier=Digi-Key; ComponentLink3Description: https://datasheet.ciiva.com/1962/mic20xx-1962500.pdf?src-supplier=Digi-Key; ComponentLink4URL: https://datasheet.ciiva.com/1962/mic20xx-1962499.pdf?src-supplier=Digi-Key; ComponentLink4Description: https://datasheet.ciiva.com/1962/mic20xx-1962499.pdf?src-supplier=Digi-Key; ComponentLink5URL: https://datasheet.ciiva.com/1962/mic20xx-1962501.pdf?src-supplier=Digi-Key; ComponentLink5Description: https://datasheet.ciiva.com/1962/mic20xx-1962501.pdf?src-supplier=Digi-Key; ComponentLink6URL: https://datasheet.ciiva.com/16382/mic20xx-16382581.pdf?src-supplier=Future+Electronics; ComponentLink6Description: https://datasheet.ciiva.com/16382/mic20xx-16382581.pdf?src-supplier=Future+Electronics; Supplier Part Number 1: 9101688
footprint SOT-23-6
pins: 1 VIN, 2 GND, 3 ENABLE, 4 FAULT, 5 ILIMT, 6 VOUT

## MIC94062YC6-TR
designator U?
IC PWR SWITCH P-CHAN 1:1 SC70-6; Manufacturer: Microchip; Manufacturer Part Number: MIC94062YC6-TR; Number of Outputs: 1; Output Current: 2A; Min Supply Voltage: 1.7V; Max Supply Voltage: 5.5V; Turn-Off Delay Time: 200ns; On-State Resistance: 77mR; Turn-On Delay Time: 1.5us; Interface: On/Off; Output Configuration: High Side; On-state Resistance-Max: 110MR; Supplier 1: Newark; RoHS: Yes; Category: Hot Swap Controllers; Pricing 1: 1=0.67500, 3000=0.67500 (USD); Mount: Surface Mount; Case/Package: SC; Number of Pins: 6; Min Operating Temperature: -40°C; Max Operating Temperature: 125°C; Packaging: Tape and Reel; Nominal Supply Current: 2A; Package Quantity: 3000; Number of Inputs: 1; Max Output Current: 2A; Max Input Voltage: 5.5V; Min Input Voltage: 1.7V; Current Rating: 2A; Operating Supply Voltage: 5.5V; Number of Channels: 1; Supply Current: 2A; Series: -; Rated Current-Max: 2A; Length: 2.2mm; Width: 1.35mm; Height: 1mm; Radiation Hardening: No; REACH SVHC: No SVHC; Lead Free: Lead Free; RoHS Compliant: Yes; ComponentLink1URL: https://datasheet.ciiva.com/16217/mic94062-63-16217137.pdf?src-supplier=Future+Electronics; ComponentLink1Description: https://datasheet.ciiva.com/16217/mic94062-63-16217137.pdf?src-supplier=Future+Electronics; ComponentLink2URL: https://datasheet.ciiva.com/15108/getdatasheetpartid-57136-15108928.pdf?src-supplier=Verical; ComponentLink2Description: https://datasheet.ciiva.com/15108/getdatasheetpartid-57136-15108928.pdf?src-supplier=Verical; ComponentLink3URL: https://datasheet.ciiva.com/7642/250162-7642583.pdf?src-supplier=Element14; ComponentLink3Description: https://datasheet.ciiva.com/7642/250162-7642583.pdf?src-supplier=Element14; ComponentLink4URL: https://datasheet.ciiva.com/1955/mic94062-63-1955048.pdf?src-supplier=Digi-Key; ComponentLink4Description: https://datasheet.ciiva.com/1955/mic94062-63-1955048.pdf?src-supplier=Digi-Key; ComponentLink5URL: https://datasheet.ciiva.com/1955/mic94062-63-1955047.pdf?src-supplier=Digi-Key; ComponentLink5Description: https://datasheet.ciiva.com/1955/mic94062-63-1955047.pdf?src-supplier=Digi-Key; ComponentLink6URL: https://datasheet.ciiva.com/1955/mic94062-63-1955049.pdf?src-supplier=Digi-Key; ComponentLink6Description: https://datasheet.ciiva.com/1955/mic94062-63-1955049.pdf?src-supplier=Digi-Key; Supplier Part Number 1: 71Y3240
footprint SC-70-6
pins: 1 VOUT, 2 GND, 3 ENABLE, 4 VIN, 5 GND, 6 NC

## MPZ1608S121ATDH5
designator FB?
FERRITE BEAD 120 OHM 0603 1LN; Manufacturer: TDK; Number of Lines: 1; Max Current Rating: 2A; DC Resistance (DCR): 45mR; Impedance: 120R; Tolerance: 25%; Test Frequency: 100MHz; Supplier 1: Digi-Key; Manufacturer Part Number: MPZ1608S121ATDH5; RoHS: Yes; Category: Ferrite Beads and Chips; Pricing 1: 1=0.11000, 10=0.08600, 25=0.07720, 50=0.05660, 100=0.04890, 250=0.03860, 500=0.03260, 1000=0.02746 (USD); Mount: Surface Mount; Case/Package: 0603; Case Code (Metric): 1608; Case Code (Imperial): 0603; Weight: 7.1E-05oz; Min Operating Temperature: -55°C; Max Operating Temperature: 125°C; Package Quantity: 4000; Packaging: Tape and Reel; Termination: SMD/SMT; Max DC Current: 2A; Length: 0.063inch; Width: 0.031inch; Height: 0.03inch; Ratings: AEC-Q200; RoHS Compliant: Yes; ComponentLink1URL: https://media.digikey.com/pdf/Data%20Sheets/TDK%20PDFs/MPZ_Series_Br.pdf?src-supplier=Digi-Key; ComponentLink1Description: https://media.digikey.com/pdf/Data%20Sheets/TDK%20PDFs/MPZ_Series_Br.pdf?src-supplier=Digi-Key; ComponentLink2URL: http://www.mouser.com/ds/2/400/eads_commercial_power_mpz1608_en-923650.pdf?src-supplier=Mouser; ComponentLink2Description: http://www.mouser.com/ds/2/400/eads_commercial_power_mpz1608_en-923650.pdf?src-supplier=Mouser; ComponentLink3URL: https://product.tdk.com/info/en/catalog/datasheets/beads_automotive_power_mpz1608_en.pdf?src-supplier=Digi-Key; ComponentLink3Description: https://product.tdk.com/info/en/catalog/datasheets/beads_automotive_power_mpz1608_en.pdf?src-supplier=Digi-Key; Supplier Part Number 1: 445-172891-6-ND
footprint MPZ1608S121ATDH5 (FERRITE BEAD 120 OHM 0603 1LN)
pins: 1, 2

## MWPY4020-3R3M-T
designator L?, comment 3.3uH
1.4A 3.3uH ±20% 0.07Ω 3.2A SMD,4x4x2mm Power Inductors ROHS; Manufacturer: Me-TECH; Manufacturer Part Number: MWPY4020-3R3M-T; Footprint: Footprint; ComponentLink1Description: LCSC; ComponentLink1URL: https://lcsc.com/product-detail/Power-Inductors_Me-TECH-MWPY4020-3R3M-T_C2934994.html
footprint MWPY4020-3R3M-T
pins: 1, 2

## MX25L8006EM2I-12G
designator U?
IC FLASH 8MBIT SPI 86MHZ 8SOP; Manufacturer: Macronix; Manufacturer Part Number: MX25L8006EM2I-12G; Operating Supply Voltage: 3.6V; Density: 8Mb; Interface: SPI,Serial; Memory Type: Non-Volatile,FLASH; Supplier 1: Future Electronics; RoHS: Yes; Category: Flash; Stock 1: 5568; Pricing 1: 1=0.54000, 75=0.47500, 250=0.46000, 750=0.44500, 2500=0.43000 (USD); Mount: Surface Mount; Case/Package: SOIC; Min Operating Temperature: -40°C; Max Operating Temperature: 85°C; Max Frequency: 86MHz; Packaging: Rail/Tube; Package Quantity: 98; Frequency: 86MHz; Memory Size: 8Mb; Series: MX25xxx05/06; Supply Voltage-Nom: 3.6V; Lead Free: Lead Free; Temperature Grade: INDUSTRIAL; RoHS Compliant: Yes; ComponentLink1URL: http://ckassoc.com/oldsite/pdf/Macronix_Product_Line_Card_July_2017_General%20_070617.pdf?src-supplier=Digi-Key; ComponentLink1Description: http://ckassoc.com/oldsite/pdf/Macronix_Product_Line_Card_July_2017_General%20_070617.pdf?src-supplier=Digi-Key; ComponentLink2URL: http://www.macronix.com/Lists/DataSheet/Attachments/1610/MX25L8006E,%203V,%208Mb,%20v1.4.pdf?src-supplier=Future+Electronics; ComponentLink2Description: http://www.macronix.com/Lists/DataSheet/Attachments/1610/MX25L8006E,%203V,%208Mb,%20v1.4.pdf?src-supplier=Future+Electronics; Supplier Part Number 1: 1123114
footprint SOP- 8
pins: 1 CS#, 2 SO/SIO1, 3 WP#, 4 GND, 5 SI/SIO0, 6 SCLK, 7 HOLD#, 8 VCC

## NX3215SA-32.768K-STD-MUA-8
designator X?, comment 32.7680KHZ
CRYSTAL 32.7680KHZ 12.5PF SMD; Manufacturer: NDK; Manufacturer Part Number: NX3215SA-32.768K-STD-MUA-8; Frequency: 32.768kHz; Frequency Tolerance: 20ppm; ESR (Equivalent Series Resistance): 70kR; Supplier 1: Digi-Key; Stock 1: 29951; Pricing 1: 1=0.68, 10=0.602, 50=0.5628, 100=0.4974, 500=0.47124, 1000=0.3927 (USD); Mount: Surface Mount; Case/Package: SMD/SMT; Number of Pins: 2; Min Operating Temperature: -40°C; Max Operating Temperature: 85°C; Package Quantity: 1000; Load Capacitance: 12.5pF; Packaging: Tape and Reel; Length: 0.126inch; Height: 0.035inch; Width: 0.059inch; Lead Free: Lead Free; ComponentLink1URL: https://media.digikey.com/pdf/Data%20Sheets/NDK%20PDFs/NX3215SA-32.768K-STD-MUA-8.pdf?src-supplier=Digi-Key; ComponentLink1Description: https://media.digikey.com/pdf/Data%20Sheets/NDK%20PDFs/NX3215SA-32.768K-STD-MUA-8.pdf?src-supplier=Digi-Key; ComponentLink2URL: http://www.ndk.com/images/products/catalog/c_NX3215SA-STD-MUA-14_e.pdf?src-supplier=Digi-Key; ComponentLink2Description: http://www.ndk.com/images/products/catalog/c_NX3215SA-STD-MUA-14_e.pdf?src-supplier=Digi-Key; Supplier Part Number 1: 644-1156-6-ND
footprint NX3215SA-32.768K-STD-MUA-8
pins: 1, 2

## PCM1754DBQR
designator U?
IC DAC/AUDIO 24BIT 200K 16SSOP; Manufacturer: Texas Instruments; Manufacturer Part Number: PCM1754DBQR; Number of DAC Channels: 2; Operating Supply Voltage: 5V; Max Power Dissipation: 105mW; Interface: Serial,3-WIRE; Number of Bits: 24; Sampling Rate: 192000S/s; Resolution: 24b; Signal to Noise Ratio (SNR): 106dB; Supply Type: Single; Conversion Rate: 192KS/s; Nominal Supply Current: 30mA; Power Consumption: 80mW; Number of Analog Inputs: 0; Output Type: Voltage; Min Supply Voltage: 4.5V; Max Supply Voltage: 5.5V; Integral Nonlinearity (INL): 0.5LSB; Polarity: Bipolar; Supplier 1: Mouser; RoHS: Yes; Category: Amplifiers - Audio; Stock 1: 908; Pricing 1: 1=2.14000, 10=1.93000, 25=1.82000, 50=1.82000, 100=1.55000, 250=1.46000, 500=1.28000, 1000=1.06000, 10000=1.06000 (USD); Mount: Surface Mount; Case/Package: SSOP; Number of Pins: 16; Weight: 0.002603oz; Contact Plating: Gold; Min Operating Temperature: -40°C; Max Operating Temperature: 85°C; Packaging: Tape and Reel; Number of Channels: 2; Package Quantity: 2000; Number of Converters: 2; Number of Analog Outputs: 2; Series: PCM1754; Output Polarity: Bipolar; Length: 5mm; Width: 4mm; Height: 1.5mm; Radiation Hardening: No; Lead Free: Lead Free; RoHS Compliant: Yes; ComponentLink1URL: https://datasheet.ciiva.com/41460/001186173-da-01-en-ic-dac-24bit-mon-pcm1754dbqr-ssop-16-tid-41460109.pdf?src-supplier=Conrad; ComponentLink1Description: https://datasheet.ciiva.com/41460/001186173-da-01-en-ic-dac-24bit-mon-pcm1754dbqr-ssop-16-tid-41460109.pdf?src-supplier=Conrad; ComponentLink2URL: https://datasheet.ciiva.com/1388/pcm1753-1388404.pdf?src-supplier=Digi-Key; ComponentLink2Description: https://datasheet.ciiva.com/1388/pcm1753-1388404.pdf?src-supplier=Digi-Key; ComponentLink3URL: https://datasheet.ciiva.com/1388/pcm1753-1388403.pdf?src-supplier=Digi-Key; ComponentLink3Description: https://datasheet.ciiva.com/1388/pcm1753-1388403.pdf?src-supplier=Digi-Key; ComponentLink4URL: https://datasheet.ciiva.com/1388/pcm1753-1388405.pdf?src-supplier=Digi-Key; ComponentLink4Description: https://datasheet.ciiva.com/1388/pcm1753-1388405.pdf?src-supplier=Digi-Key; ComponentLink5URL: https://datasheet.ciiva.com/15146/getdatasheetpartid-213919-15146955.pdf?src-supplier=Verical; ComponentLink5Description: https://datasheet.ciiva.com/15146/getdatasheetpartid-213919-15146955.pdf?src-supplier=Verical; Supplier Part Number 1: 595-PCM1754DBQR
footprint 16-SSOP
pins: 1 BCK, 2 DATA, 3 LRCK, 4 DGND, 5 NC, 6 VCC, 7 VOUTL, 8 VROUT, 9 AGND, 10 VCOM, 11 ZEROA, 12 TEST, 13 DEMP, 14 MUTE, 15 FMT, 16 SCK

## PCM1789TPWRQ1
designator U?
IC DAC/AUDIO 24BIT 192K 24TSSOP; Manufacturer: Texas Instruments; Manufacturer Part Number: PCM1789TPWRQ1; Number of Channels: 2; Operating Supply Voltage: 5V; Min Supply Voltage: 4.5V; Max Supply Voltage: 5.5V; Interface: I2C,SPI,Serial,3-WIRE; Max Power Dissipation: 239mW; Number of Bits: 24; Resolution: 24b; Supply Type: Analog,Digital; Conversion Rate: 192KS/s; Power Consumption: 154mW; Number of Analog Inputs: 0; Output Type: Voltage; Supplier 1: Digi-Key; RoHS: Yes; Category: Amplifiers - Audio; Mount: Surface Mount; Case/Package: TSSOP; Number of Pins: 24; Min Operating Temperature: -40°C; Max Operating Temperature: 105°C; Packaging: Tape and Reel; Number of DAC Channels: 2; Package Quantity: 2000; Number of Converters: 2; Number of Analog Outputs: 2; Series: PCM1789-Q1; Lead Free: Lead Free; RoHS Compliant: Yes; ComponentLink1URL: https://datasheet.ciiva.com/1389/pcm1789-q1-1389256.pdf?src-supplier=Digi-Key; ComponentLink1Description: https://datasheet.ciiva.com/1389/pcm1789-q1-1389256.pdf?src-supplier=Digi-Key; ComponentLink2URL: https://datasheet.ciiva.com/14255/sbas546-14255107.pdf?src-supplier=Avnet; ComponentLink2Description: https://datasheet.ciiva.com/14255/sbas546-14255107.pdf?src-supplier=Avnet; Supplier Part Number 1: 296-28413-1-ND
footprint TSSOP-24
pins: 1 LRCK, 2 BCK, 3 DIN, 4 RST, 5 SCKI, 6 VDD, 7 DGND, 8 VCC1, 9 VCOM, 10 AGND1, 11 VOUTL-, 12 VOUTL+, 13 VOUTR+, 14 VOUTR-, 15 AGND2, 16 VCC2, 17 AMUTEI, 18 ZERO2/AMUTEO, 19 ZERO1, 20 MODE, 21 MD/SDA/DEMP, 22 MC/SCL/FMT, 23 MS/ADR0/RSV, 24 ADR5/ADR1/RSV

## PCM1865DBTR
designator U?
IC ADC/AUDIO 24BIT 192K 30TSSOP; Manufacturer: Texas Instruments; Manufacturer Part Number: PCM1865DBTR; Interface: I2C,SPI,Serial; Operating Supply Voltage: 3.3V; Sampling Rate: 192KS/s; Resolution: 24b; Operating Supply Current: 31mA; Supply Type: Single; Number of A/D Converters: 4; Power Consumption: 145mW; Max Supply Voltage: 3.6V; Min Supply Voltage: 3V; Number of Analog Inputs: 8; Number of DAC Channels: 0; Supplier 1: Mouser; RoHS: Yes; Category: Amplifiers - Audio; Pricing 1: 1=10.72000, 10=9.69000, 25=9.23000, 50=9.23000, 100=8.02000, 250=7.66000, 500=6.98000, 1000=6.54000, 10000=6.54000 (USD); Mount: Surface Mount; Case/Package: TSSOP; Number of Pins: 30; Weight: 0.003439oz; Contact Plating: Gold; Min Operating Temperature: -40°C; Max Operating Temperature: 125°C; Package Quantity: 2000; Packaging: Tape and Reel; Number of ADC Channels: 4; Lead Free: Lead Free; RoHS Compliant: Yes; ComponentLink1URL: https://datasheet.ciiva.com/48474/pcm1861-48474798.pdf?src-supplier=Avnet; ComponentLink1Description: https://datasheet.ciiva.com/48474/pcm1861-48474798.pdf?src-supplier=Avnet; ComponentLink2URL: https://datasheet.ciiva.com/29699/pcm1861-29699238.pdf?src-supplier=Digi-Key; ComponentLink2Description: https://datasheet.ciiva.com/29699/pcm1861-29699238.pdf?src-supplier=Digi-Key; Supplier Part Number 1: 595-PCM1865DBTR
footprint PCM1865DBTR
pins: 1 VINL2/VIN1M, 2 VINR2/VIN2M, 3 VINL1/VIN1P, 4 VINR1/VIN2P, 5 Mic Bias, 6 VREF, 7 AGND, 8 AVDD, 9 XO, 10 XI, 11 LDO, 12 DGND, 13 DVDD, 14 IOVDD, 15 SCKI, 16 LRCK, 17 BCK, 18 DOUT, 19 INT, 20 MD6, 21 MD5, 22 MD4, 23 MD2, 24 MD3, 25 MD1, 26 MD0, 27 VINL4/VIN4M, 28 VINR4/VIN3M, 29  VINL3/VIN4P, 30  VINR3/VIN3P

## PRO-OB-440
designator U?
RF ANT 2.4GHZ STAMPED MET SLD; Manufacturer: Proant; Manufacturer Part Number: PRO-OB-440; Number of Bands: 1; Return Loss: -10dB; Supplier 1: Digi-Key; Stock 1: 23502; Pricing 1: 1=0.74, 10=0.647, 25=0.608, 100=0.4964, 250=0.46104, 500=0.39238 (USD); Mount: Surface Mount; Packaging: Cut Tape; Termination: Solder; ComponentLink1URL: https://media.digikey.com/pdf/Data%20Sheets/Proant%20PDF's/PRO-OB-440_Dwg.PDF?src-supplier=Digi-Key; ComponentLink1Description: https://media.digikey.com/pdf/Data%20Sheets/Proant%20PDF's/PRO-OB-440_Dwg.PDF?src-supplier=Digi-Key; ComponentLink2URL: http://www.proant.se/files/user/Application%20note%20-%20OnBoard%20SMD%20GNSS%20rev%202.0.pdf?src-supplier=Digi-Key; ComponentLink2Description: http://www.proant.se/files/user/Application%20note%20-%20OnBoard%20SMD%20GNSS%20rev%202.0.pdf?src-supplier=Digi-Key; ComponentLink3URL: http://www.proant.se/files/user/Documents/Datasheet%20-%20OnBoard%20SMD%202400%20MHz%20rev%203.pdf?src-supplier=Digi-Key; ComponentLink3Description: http://www.proant.se/files/user/Documents/Datasheet%20-%20OnBoard%20SMD%202400%20MHz%20rev%203.pdf?src-supplier=Digi-Key; Supplier Part Number 1: 1532-1001-6-ND
footprint PRO-OB-440 (RF ANT 2.4GHZ STAMPED MET SLD)
pins: 1 A, 2 A, 3 A hidden, 4 A hidden

## PSPMAA0412-1R0M-ANP
designator L?, comment 1uH
4.5A 1uH ±20% 70mΩ 5.5A SMD,4.2x4.4x1.2mm Power Inductors ROHS; Manufacturer: PROD Tech; Manufacturer Part Number: PSPMAA0412-1R0M-ANP; ComponentLink1Description: LCSC; ComponentLink1URL: https://lcsc.com/product-detail/Power-Inductors_PROD-Tech-PSPMAA0412-1R0M-ANP_C705331.html; Footprint: Custom
footprint PSPMAA0412-1R0M-ANP (IND SMD 1uH)
pins: 1, 2

## PTFR0603B499RP9
designator R?, comment 499R
100mW Thin Film Resistor 100V ±0.1% ±25ppm/℃ -55℃~+125℃ 499Ω 0603 Chip Resistor - Surface Mount ROHS; Manufacturer: Resistor.Today; Manufacturer Part Number: PTFR0603B499RP9; Footprint: 0603; ComponentLink1Description: LCSC; ComponentLink1URL: https://lcsc.com/product-detail/Chip-span-style-background-color-ff0-Resistor-span-Surface-Mount_span-style-background-color-ff0-Resistor-span-Today-PTFR0603B499RP9_C478882.html
footprint Res0603
pins: 1, 2

## PZ254R-11-07P
designator J?
Shrouded Square Pins 2.5mm 6mm -40℃~+105℃ 1 7 2.54mm Black Brass 1x7P Plugin,P=2.54mm Pin Headers ROHS; Manufacturer: XFCN; Manufacturer Part Number: PZ254R-11-07P; Footprint: Custom; ComponentLink1Description: LCSC; ComponentLink1URL: https://lcsc.com/product-detail/Pin-Headers_XFCN-PZ254R-11-07P_C492415.html
footprint HDR1X7H (Connector; Header; 7 Position; Right Angle)
pins: 1, 2, 3, 4, 5, 6, 7

## Q22FA12800078
designator X?, comment 37.4MHz
37.4MHz SMD Crystal Resonator 9pF 60Ω ±10ppm -40℃~+85℃ SMD2016-4P Crystals; Manufacturer: Seiko; Manufacturer Part Number: Q22FA12800078; Footprint: Custom; ComponentLink1Description: LCSC; ComponentLink1URL: https://www.lcsc.com/product-detail/Crystals_Seiko-Epson-Q22FA12800078_C255897.html
footprint Q22FA12800078 (37.4MHz SMD Crystal Resonator 9pF 60O ±10ppm -40?~+85? SMD2016-4P Crystals)
pins: 1 CRYSTAL, 2 GND, 3 CRYSTAL, 4 GND